# Altium footprint library SamacSys.PcbLib: 23 footprints (part 2 of 2)
Each footprint in its own frame and in the unit in brackets; x right, y up, seen from the top. Pads: shape width x height; smd on the part's side, far side on the other; paste and mask are expansions set on the pad; w line width, h text height; cw(c..) or ccw(c..) is an arc to the next point about the centre after c.
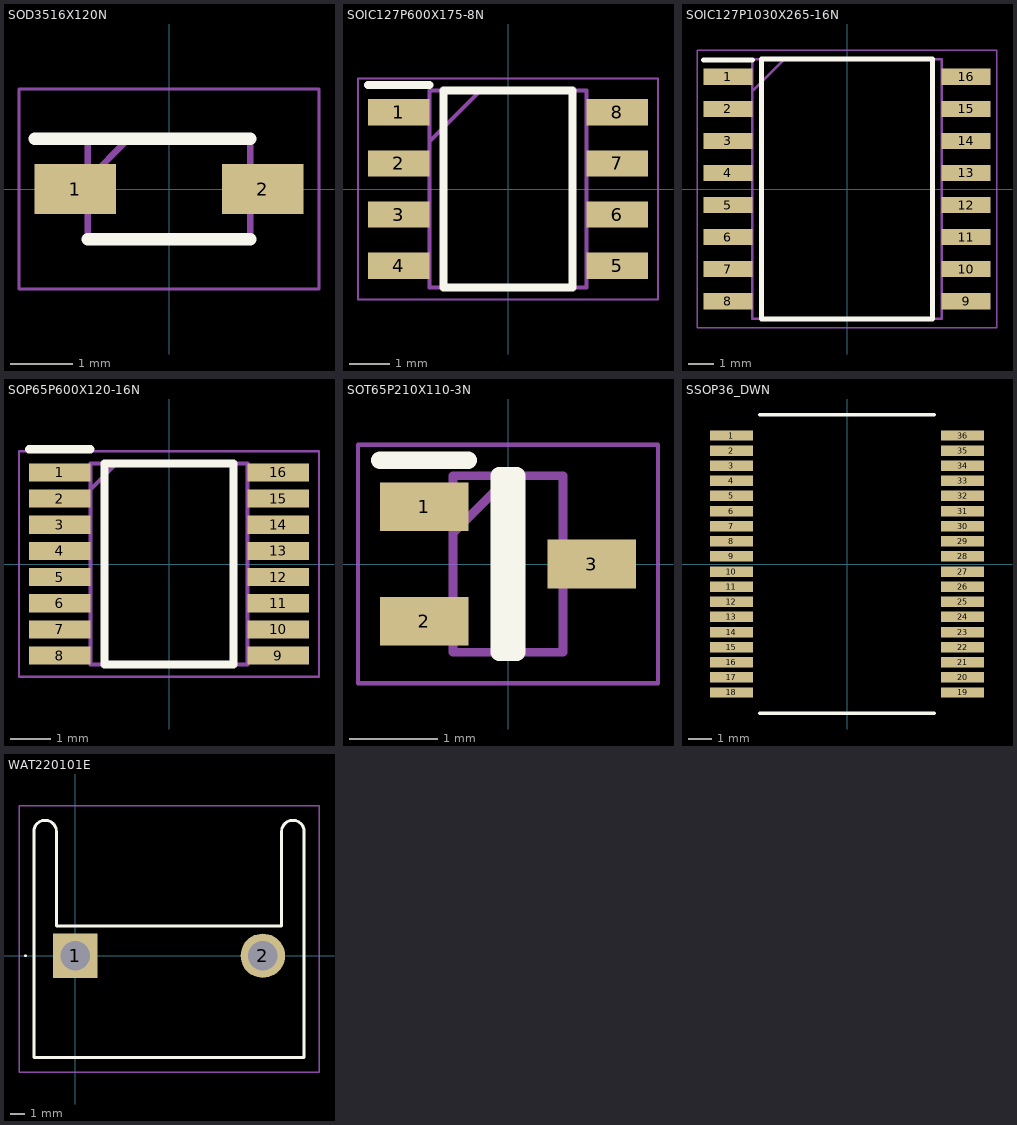
[diagram p1: the footprints below, top view; thin cyan lines are the x and y axes]

## SOD3516X120N [mm]
pads (2):
  rect 1.3x0.8 smd: 1(-1.5,0) 2(1.5,0)
Top Overlay:
  lines w0.2: -2.15,0.8 1.3,0.8 ; -1.3,-0.8 1.3,-0.8
Mechanical 13:
  lines w0.1: -1.3,0.15 -0.65,0.8 ; -1.3,-0.8 -1.3,0.8 1.3,0.8 1.3,-0.8 -1.3,-0.8
Mechanical 15:
  lines w0.05: -2.4,-1.6 -2.4,1.6 2.4,1.6 2.4,-1.6 -2.4,-1.6
3D body "PMEG4010CEH.stp": height 1.1, standoff 0, extent -1.751,-0.805 1.749,0.795

## SOIC127P600X175-8N [mm]
pads (8):
  rect 1.525x0.65 smd: 1(-2.712,1.905) 2(-2.712,0.635) 3(-2.712,-0.635) 4(-2.712,-1.905) 5(2.712,-1.905) 6(2.712,-0.635) 7(2.712,0.635) 8(2.712,1.905)
Top Overlay:
  lines w0.2: -3.475,2.58 -1.95,2.58 ; -1.6,-2.45 -1.6,2.45 1.6,2.45 1.6,-2.45 -1.6,-2.45
Mechanical 13:
  lines w0.1: -1.95,1.18 -0.68,2.45 ; -1.95,-2.45 -1.95,2.45 1.95,2.45 1.95,-2.45 -1.95,-2.45
Mechanical 15:
  lines w0.05: -3.725,-2.75 -3.725,2.75 3.725,2.75 3.725,-2.75 -3.725,-2.75
3D body "NE555DR.stp": height 1.75, standoff 0, extent -3,-2.45 3,2.45

## SOIC127P1030X265-16N [mm]
pads (16):
  rect 1.95x0.65 smd: 1(-4.725,4.445) 2(-4.725,3.175) 3(-4.725,1.905) 4(-4.725,0.635) 5(-4.725,-0.635) 6(-4.725,-1.905) 7(-4.725,-3.175) 8(-4.725,-4.445) 9(4.725,-4.445) 10(4.725,-3.175) 11(4.725,-1.905) 12(4.725,-0.635) 13(4.725,0.635) 14(4.725,1.905) 15(4.725,3.175) 16(4.725,4.445)
Top Overlay:
  lines w0.2: -5.7,5.12 -3.75,5.12 ; -3.4,-5.15 -3.4,5.15 3.4,5.15 3.4,-5.15 -3.4,-5.15
Mechanical 13:
  lines w0.1: -3.75,3.88 -2.48,5.15 ; -3.75,-5.15 -3.75,5.15 3.75,5.15 3.75,-5.15 -3.75,-5.15
Mechanical 15:
  lines w0.05: -5.95,-5.5 -5.95,5.5 5.95,5.5 5.95,-5.5 -5.95,-5.5
3D body "UCC21750QDWRQ1.stp": height 0, standoff 0, extent 0,0 0,0

## SOP65P600X120-16N [mm]
pads (16):
  rect 1.525x0.45 smd: 1(-2.712,2.275) 2(-2.712,1.625) 3(-2.712,0.975) 4(-2.712,0.325) 5(-2.712,-0.325) 6(-2.712,-0.975) 7(-2.712,-1.625) 8(-2.712,-2.275) 9(2.712,-2.275) 10(2.712,-1.625) 11(2.712,-0.975) 12(2.712,-0.325) 13(2.712,0.325) 14(2.712,0.975) 15(2.712,1.625) 16(2.712,2.275)
Top Overlay:
  lines w0.2: -3.475,2.85 -1.95,2.85 ; -1.6,-2.5 -1.6,2.5 1.6,2.5 1.6,-2.5 -1.6,-2.5
Mechanical 13:
  lines w0.1: -1.95,1.85 -1.3,2.5 ; -1.95,-2.5 -1.95,2.5 1.95,2.5 1.95,-2.5 -1.95,-2.5
Mechanical 15:
  lines w0.05: -3.725,-2.8 -3.725,2.8 3.725,2.8 3.725,-2.8 -3.725,-2.8
3D body "TLE4972-AE35D5.stp": height 1.2, standoff 0, extent -3,-2.5 3,2.5

## SOT65P210X110-3N [mm]
pads (3):
  rect 1x0.55 smd: 1(-0.95,0.65) 2(-0.95,-0.65) 3(0.95,0)
Top Overlay:
  lines w0.2: -1.45,1.175 -0.45,1.175 ; -0.1,-1 -0.1,1 0.1,1 0.1,-1 -0.1,-1
Mechanical 13:
  lines w0.1: -0.625,0.35 0.025,1 ; -0.625,-1 -0.625,1 0.625,1 0.625,-1 -0.625,-1
Mechanical 15:
  lines w0.05: -1.7,-1.35 -1.7,1.35 1.7,1.35 1.7,-1.35 -1.7,-1.35
3D body "BZX84W-C3V3F.stp": height 0.95, standoff 0, extent -1.052,-1.049 1.048,1.051

## SSOP36_DWN [mm] "TI DWN0036A SSOP-36 (0.65 mm pitch, verify)"
pads (36):
  rect 1.85x0.45 smd: 1(-4.975,5.524) 2(-4.975,4.874) 3(-4.975,4.224) 4(-4.975,3.574) 5(-4.975,2.926) 6(-4.975,2.276) 7(-4.975,1.626) 8(-4.975,0.975) 9(-4.975,0.325) 10(-4.975,-0.325) 11(-4.975,-0.975) 12(-4.975,-1.626) 13(-4.975,-2.276) 14(-4.975,-2.926) 15(-4.975,-3.574) 16(-4.975,-4.224) 17(-4.975,-4.874) 18(-4.975,-5.524) 19(4.975,-5.524) 20(4.975,-4.874) 21(4.975,-4.224) 22(4.975,-3.574) 23(4.975,-2.926) 24(4.975,-2.276) 25(4.975,-1.626) 26(4.975,-0.975) 27(4.975,-0.325) 28(4.975,0.325) 29(4.975,0.975) 30(4.975,1.626) 31(4.975,2.276) 32(4.975,2.926) 33(4.975,3.574) 34(4.975,4.224) 35(4.975,4.874) 36(4.975,5.524)
Top Overlay:
  lines w0.152: -3.749,-6.416 3.749,-6.416 ; -3.749,6.416 3.749,6.416

## WAT220101E [mm]
pads (2):
  rect 3x3 hole 2: 1(0,0)
  round 3 hole 2: 2(12.7,0)
Top Overlay:
  lines w0.1: -3.4,0 cw(c-3.35,0) -3.3,0 cw(c-3.35,0) -3.4,0
  lines w0.2: -2.8,-6.9 -2.8,8.4 cw(c-2.035,8.4) -1.27,8.4 -1.27,2 6.35,2 13.97,2 13.97,8.4 cw(c14.735,8.4) 15.5,8.4 15.5,-6.9 -2.8,-6.9
Mechanical 13:
  lines w0.1: -2.8,-6.9 -2.8,8.4 cw(c-2.035,8.4) -1.27,8.4 -1.27,2 6.35,2 13.97,2 13.97,8.4 cw(c14.735,8.4) 15.5,8.4 15.5,-6.9 -2.8,-6.9
Mechanical 15:
  lines w0.1: -3.8,-7.9 16.5,-7.9 16.5,10.165 -3.8,10.165 -3.8,-7.9
3D body "WA-T220-101E.stp": height 32.63, standoff -2.93, extent -2.794,-6.868 15.494,9.131